# Altium footprint library General_Lib.PcbLib: 26 footprints (part 2 of 2)
Each footprint in its own frame and in the unit in brackets; x right, y up, seen from the top. Pads: shape width x height; smd on the part's side, far side on the other; paste and mask are expansions set on the pad; w line width, h text height; cw(c..) or ccw(c..) is an arc to the next point about the centre after c.
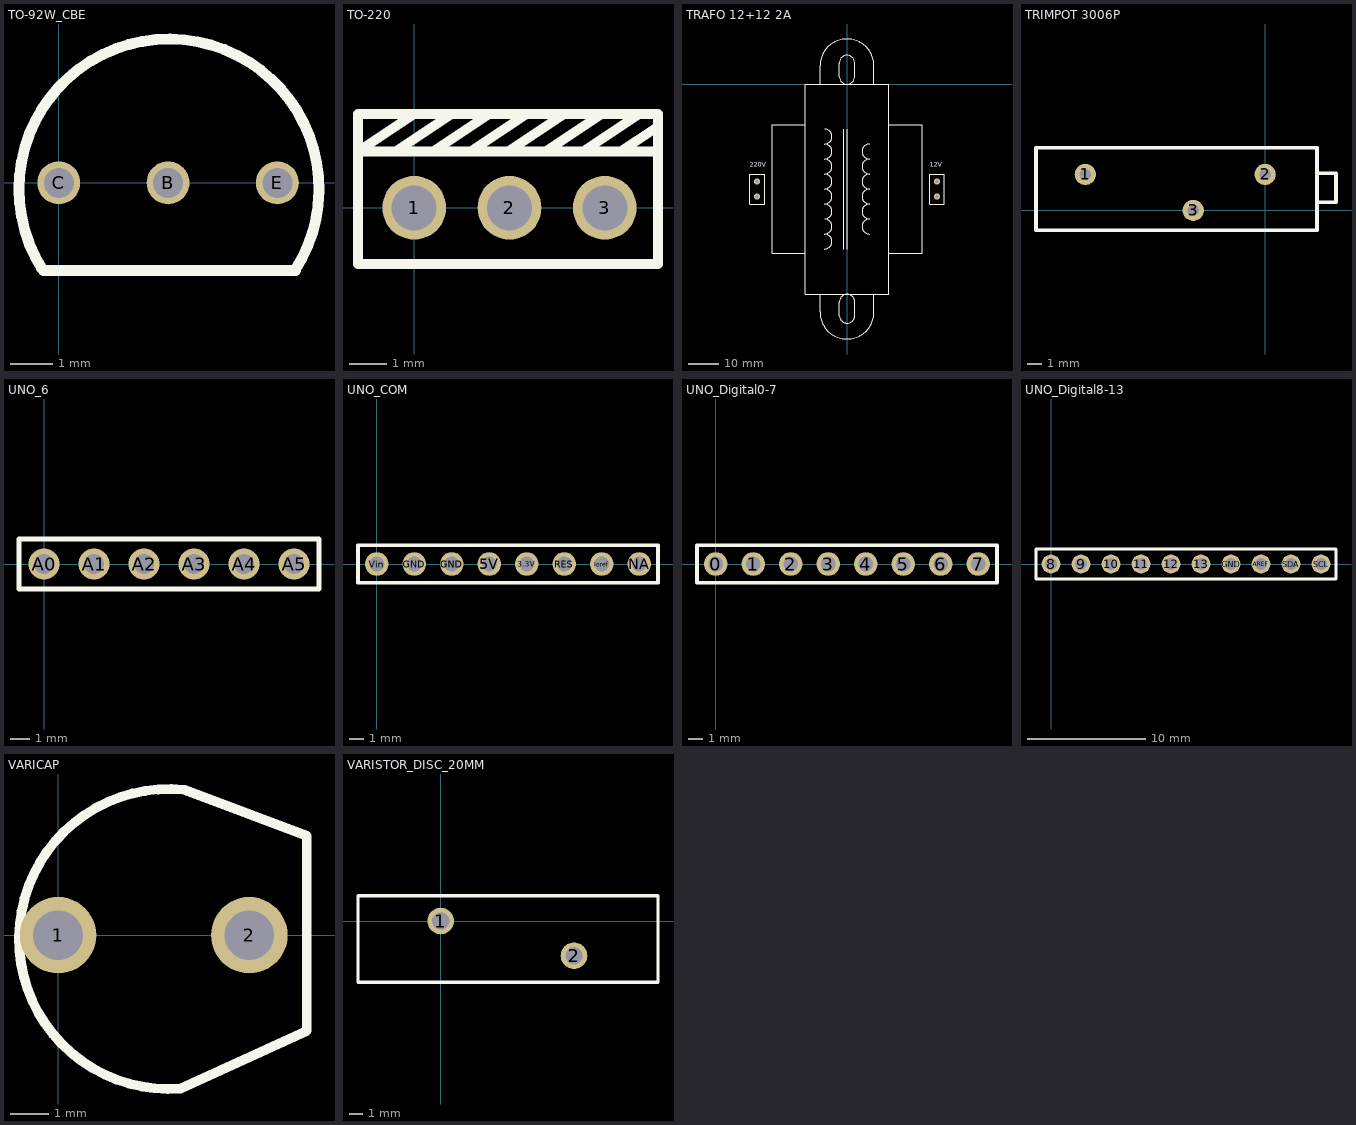
[diagram p1: the footprints below, top view; thin cyan lines are the x and y axes]

## TO-92W_CBE [mm]
pads (3):
  round 1 hole 0.7: B(2.55,0) C(0,0) E(5.1,0)
Top Overlay:
  lines w0.254: -0.399,-1.993 cw(c2.572,-0.144) 5.52,-2.031 ; -0.353,-2.043 5.525,-2.043
3D body "ALSRobot-TO-92W.step": height 10.2, standoff -1.1, extent -0.2,-1.55 5.33,2.55

## TO-220 [mm]
pads (3):
  round 1.7 hole 1.2: 1(0,0) 2(2.54,0) 3(5.08,0)
Top Overlay:
  lines w0.254: -0.5,1.5 1,2.5 ; 0,2.5 -1.5,1.5 ; 0.5,1.5 2,2.5 ; 1.5,1.5 3,2.5 ; 2.5,1.5 4,2.5 ; 3.5,1.5 5,2.5 ; 4.5,1.5 6,2.5 ; 5.5,1.5 6.423,2.115 ; -1.5,1.5 -1.5,2.5 6.5,2.5 6.5,1.5 ; -1.5,1.5 6.5,1.5 ; -1.5,1.5 -1.5,-1.5 6.5,-1.5 6.5,1.5
3D body "User Library-TO220AB.step": height 26.33, standoff -3, extent -3.113,-1.52 8.1,3.17

## TRAFO 12+12 2A [mm]
pads (4):
  round 2 hole 1 unplated: 1(-30,-32.5) 2(30,-32.5) 3(-30,-37.5) 4(30,-37.5)
Top Overlay:
  lines w0.254: -14,-56.5 -25,-56.5 -25,-13.5 -14,-13.5 ; -9,-70 -9,-76 ccw(c0,-76) 9,-76 9,-70 ; -9,0 -9,6 cw(c0,6) 9,6 9,0 ; -7.5,-55 ccw(c-7.5,-52.5) -7.5,-50 ccw(c-7.5,-47.5) -7.5,-45 ccw(c-7.5,-42.5) -7.5,-40 ccw(c-7.5,-37.5) -7.5,-35 ccw(c-7.5,-32.5) -7.5,-30 ccw(c-7.5,-27.5) -7.5,-25 ccw(c-7.5,-22.5) -7.5,-20 ccw(c-7.5,-17.5) -7.5,-15 ; -2.525,-72.725 -2.525,-77.175 ccw(c0.025,-77.175) 2.575,-77.175 2.575,-72.675 ccw(c0.025,-72.675) -2.525,-72.675 ; -1,-55 -1,-15 ; 0,-55 0,-15 ; 2.55,2.5 cw(c0,2.5) -2.55,2.5 -2.55,7 cw(c0,7) 2.55,7 2.55,2.55 ; 7.5,-50 cw(c7.5,-47.5) 7.5,-45 cw(c7.5,-42.5) 7.5,-40 cw(c7.5,-37.5) 7.5,-35 cw(c7.5,-32.5) 7.5,-30 cw(c7.5,-27.5) 7.5,-25 cw(c7.5,-22.5) 7.5,-20 ; 14,-56.5 25,-56.5 25,-13.5 14,-13.5 ; -32.5,-40 -32.5,-30 -27.5,-30 -27.5,-40 -32.5,-40 ; -14,-70 -14,0 14,0 14,-70 -14,-70 ; 27.5,-40 27.5,-30 32.5,-30 32.5,-40 27.5,-40
  text "220V" at -32.5,-27.5 h1.52
  text "12V" at 27.5,-27.5 h1.52
3D body "Trafo.STEP": height 64, standoff -1, extent -25,-85 25,14.8

## TRIMPOT 3006P [mm]
pads (3):
  round 1.5 hole 0.8: 1(-12.7,2.54) 2(0,2.54) 3(-5.08,0)
Top Overlay:
  lines w0.254: -15.494,-1.397 3.658,-1.397 3.658,4.42 -16.18,4.42 -16.18,-1.397 -15.24,-1.397 ; 3.73,0.579 5,0.579 5,2.611 3.73,2.611
3D body "3006p-7-100lf.STEP": height 6.86, standoff -5.08, extent -15.773,-0.863 4.801,3.963

## UNO_6 [mm]
pads (6):
  round 1.6 hole 1 unplated: A0(0,0) A1(2.54,0) A2(5.08,0) A3(7.62,0) A4(10.16,0) A5(12.7,0)
Top Overlay:
  lines w0.254: -1.27,-1.27 -1.27,1.27 13.97,1.27 13.97,-1.27 -1.27,-1.27
3D body "User Library-Header_Male_6Pin.STEP": height 9.04, standoff -2.5, extent -1.27,-1.245 13.97,1.245

## UNO_COM [mm]
pads (9):
  round 1.6 hole 1 unplated: 3.3V(10.16,0) 5V(7.62,0) GND(2.54,0) GND(5.08,0) GND(5.08,0) Ioref(15.24,0) NA(17.78,0) RES(12.7,0) Vin(0,0)
Top Overlay:
  lines w0.254: -1.27,-1.27 -1.27,1.27 19.05,1.27 19.05,-1.27 -1.27,-1.27
3D body "User Library-Header_Male_8Pin.STEP": height 9.04, standoff -2.5, extent -1.27,-1.245 19.05,1.245

## UNO_Digital0-7 [mm]
pads (8):
  round 1.6 hole 1 unplated: 0(0,0) 1(2.54,0) 2(5.08,0) 3(7.62,0) 4(10.16,0) 5(12.7,0) 6(15.24,0) 7(17.78,0)
Top Overlay:
  lines w0.254: -1.27,-1.27 -1.27,1.27 19.05,1.27 19.05,-1.27 -1.27,-1.27
3D body "User Library-Header_Male_8Pin.STEP": height 9.04, standoff -2.5, extent -1.27,-1.245 19.05,1.245

## UNO_Digital8-13 [mm]
pads (10):
  round 1.6 hole 1 unplated: 8(0,0) 9(2.54,0) 10(5.08,0) 11(7.62,0) 12(10.16,0) 13(12.7,0) AREF(17.78,0) GND(15.24,0) SCL(22.86,0) SDA(20.32,0)
Top Overlay:
  lines w0.254: -1.27,-1.27 24.13,-1.27 24.13,1.27 -1.27,1.27 -1.27,-1.27
3D body "User Library-Header_Male_10Pin.STEP": height 9.04, standoff -2.5, extent -1.27,-1.245 24.13,1.245

## VARICAP [mm]
pads (2):
  round 2 hole 1.3: 1(0,0) 2(5,0)
Top Overlay:
  lines w0.254: 3.209,-4.008 cw(c2.9,-0.1) 3.3,3.8 6.5,2.6 6.5,-2.5 3.209,-4.008
3D body "User Library-Murata TZ03.step": height 5.8, standoff -2.3, extent -0.485,-3.051 5.515,2.949

## VARISTOR_DISC_20MM [mm]
pads (2):
  round 2 hole 1.3: 1(0,0) 2(10,-2.6)
Top Overlay:
  lines w0.254: -6.2,-4.6 16.3,-4.6 16.3,1.9 -6.2,1.9 -6.2,-4.6
3D body "Varistor_20mm.STEP": height 26.5, standoff -0.99, extent -5.75,-4.2 15.75,1.598